# Altium footprint library amirlib.PcbLib: 456 footprints (part 26 of 29)
Each footprint in its own frame and in the unit in brackets; x right, y up, seen from the top. Pads: shape width x height; smd on the part's side, far side on the other; paste and mask are expansions set on the pad; w line width, h text height; cw(c..) or ccw(c..) is an arc to the next point about the centre after c.
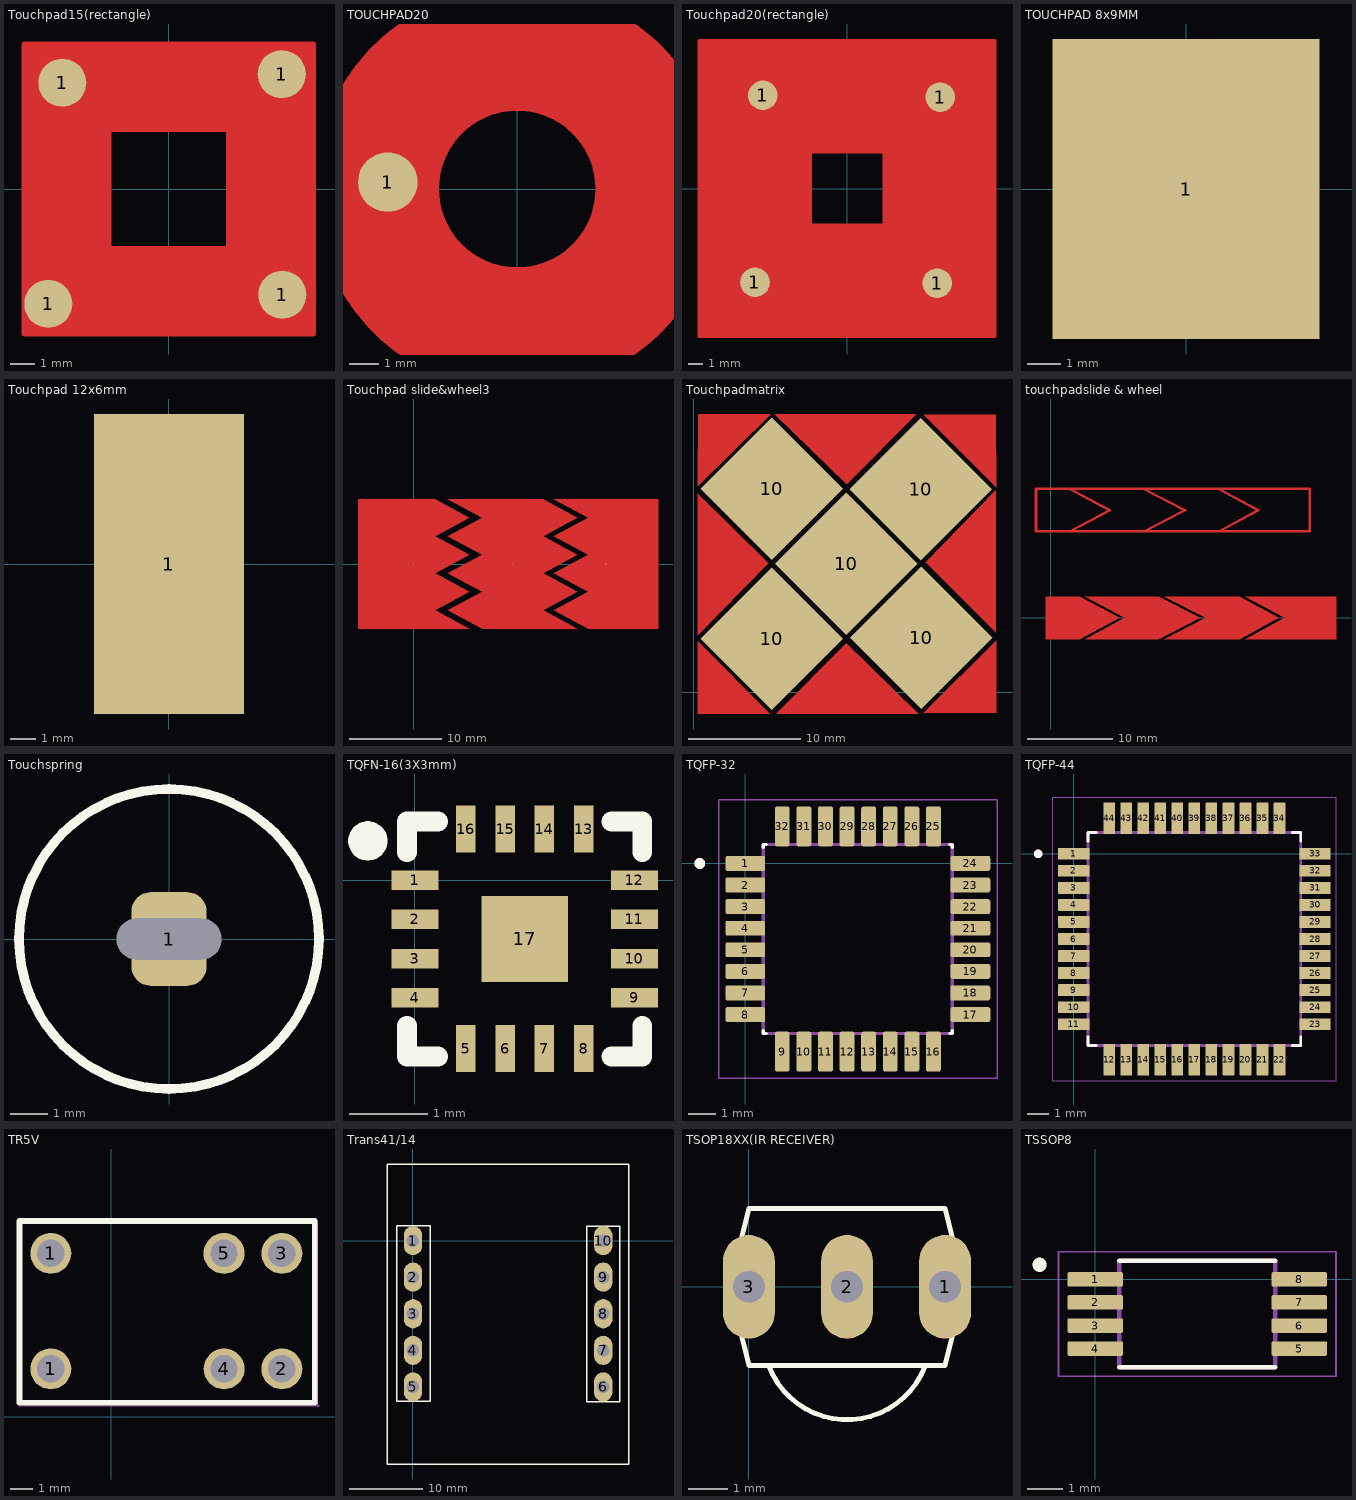
[diagram p25: the footprints below, top view; thin cyan lines are the x and y axes]

## Touchpad15(rectangle) [mm]
pads (4):
  round 2 smd: 1(-5.004,-4.775) 1(-4.42,4.42) 1(4.699,4.775) 1(4.724,-4.394)
Top Layer:
  region: -5.969,6 -5.969,2.54 5.994,2.54 5.994,6
  region: -5.994,-5.987 -5.994,2.642 -2.473,2.642 -2.473,-6.018
  region: -2.5,-2.5 -2.5,-5.893 6.02,-5.893 6.02,-2.512
  region: 2.5,2.743 6,2.743 6,-2.692 2.5,-2.692
  lines w0.254: -6,-6 -6,6 6,6 6,-6 -6,-6 ; -2.5,-2.5 -2.5,2.5 2.5,2.5 2.5,-2.5 -2.5,-2.5
Top Solder:
  region: -6.223,-6.181 -6.223,2.642 -2.388,2.642 -2.388,-6.214
  region: -6.223,6.223 -6.223,2.261 6.223,2.261 6.223,6.223
  region: 2.286,2.743 6.223,2.743 6.223,-2.692 2.286,-2.692
  region: -2.5,-2.355 -2.5,-6.223 6.248,-6.223 6.248,-2.368

## TOUCHPAD20 [mm]
pads (1):
  round 2 smd: 1(-4.343,0.229)
Top Layer:
  circle w4.2: c0,0 r4.726
Top Solder:
  circle w4.2: c0,0 r4.726

## Touchpad20(rectangle) [mm]
pads (4):
  round 2 smd: 1(-6.248,-6.35) 1(-5.715,6.325) 1(6.096,-6.401) 1(6.299,6.198)
Top Layer:
  region: 2.5,2.5 9.957,2.5 9.957,-2.5 2.5,-2.5
  region: -10,10 10,10 10,2.5 -10.054,2.5
  region: -10.054,2.5 -2.54,2.5 -2.54,-10 -10,-10
  region: -2.616,-2.5 -2.616,-10 9.957,-10 9.957,-2.5
  lines w0.254: -10,-10 10,-10 10,10 -10,10 -10,-10 ; -2.5,-2.5 2.5,-2.5 2.5,2.5 -2.5,2.5 -2.5,-2.5
Top Solder:
  rectangle: -10.165,-2.565 -2.365,2.438
  rectangle: -10.165,2.388 10.135,10.138
  rectangle: 2.362,-2.972 10.125,2.5
  rectangle: -10.135,-10.185 10.135,-2.362

## TOUCHPAD 8x9MM [mm]
pads (1):
  rect 8x9 smd: 1(0,0)

## Touchpad 12x6mm [mm]
pads (1):
  rect 6x12 smd: 1(0,0)

## Touchpad slide&wheel3 [mil]
pads (3):
  round 1 smd mask+0: 1(0,0) 2(421.26,0) 3(818.9,0)
Top Layer:
  region: 597.44,-39.37 743.11,-118.11 597.44,-196.85 743.11,-275.59 1040.35,-275.59 1040.35,275.59 597.44,275.59 743.11,196.85 597.44,118.11 743.11,39.37
  region: 145.67,-39.37 291.34,-118.11 145.67,-196.85 291.34,-275.59 696.85,-275.59 551.18,-196.85 696.85,-118.11 551.18,-39.37 696.85,39.37 551.18,118.11 696.85,196.85 551.18,275.59 145.67,275.59 291.34,196.85 145.67,118.11 291.34,39.37
  region: -237.2,-275.59 -237.2,275.59 91.54,275.59 237.2,196.85 91.54,118.11 237.2,39.37 91.54,-39.37 237.2,-118.11 91.54,-196.85 237.2,-275.59

## Touchpadmatrix [mm]
pads (13):
  rect 9x9 smd rot 45 mask+0: 10(6.95,4.8) 10(6.975,18.175) 10(13.625,11.5) 10(20.25,18.15) 10(20.3,4.875)
  round 0.025 smd mask+0: 11(3.5,11.425) 11(3.575,1.325) 11(3.625,21.625) 11(13.55,21.7) 11(13.7,1.25) 11(23.75,1.375) 11(23.75,21.55) 11(23.825,11.7)
Top Layer:
  region: 20.025,-1.887 7.375,-1.887 13.6,4.388
  region: 6.8,-1.925 0.35,4.575 0.375,-1.85 0.375,-1.901
  region: 27,4.6 20.5,-1.85 26.925,-1.825 26.976,-1.825
  region: 20.525,24.8 26.975,18.3 26.95,24.725 26.95,24.776
  region: 0.363,5.1 0.363,17.75 6.638,11.525
  region: 26.962,18.025 26.962,5.375 20.687,11.6
  region: 7.225,24.837 19.875,24.837 13.65,18.562
  region: 0.375,18.4 6.875,24.85 0.45,24.825 0.399,24.825

## touchpadslide & wheel [mil]
pads (4):
  round 1 smd mask+0: 1(147.64,0) 2(426,0) 3(792,0) 4(1112,0)
Top Layer:
  region: 901.86,98.43 1083.95,0 901.86,-98.43 1322.14,-98.43 1322.14,98.43
  region: 526.25,-98.43 718.18,0 526.25,98.43 875.66,98.43 1057.75,0 875.66,-98.43
  region: 159.27,-98.43 343.32,0 159.27,98.43 500.8,98.43 692.73,0 500.8,-98.43
  region: -23.13,-98.43 134.35,-98.43 318.41,0 134.35,98.43 -23.13,98.43
  lines w11.81: 88.58,400.59 430.12,400.59 ; 88.58,400.59 -68.9,400.59 -68.9,597.44 88.58,597.44 ; 88.58,400.59 272.64,499.02 88.58,597.44 ; 88.58,597.44 430.12,597.44 ; 430.12,400.59 779.53,400.59 ; 430.12,400.59 622.05,499.02 430.12,597.44 ; 430.12,597.44 779.53,597.44 ; 779.53,400.59 1199.8,400.59 1199.8,597.44 779.53,597.44 ; 779.53,400.59 961.61,499.02 779.53,597.44

## Touchspring [mm]
pads (1):
  rrect50% 2x2.5 / inner rrect50% 4.2x2.5 / far side rrect50% 4.2x2.5 hole 1.1 slot 2.8 at 0 deg: 1(0,0)
Top Overlay:
  circle w0.254: c0,0 r4

## TQFN-16(3X3mm) [mil]
pads (17):
  rect 23.6x9.8 smd paste-3937 mask+2: 1(0,0) 2(0,-19.6) 3(0,-39.3) 4(0,-59) 9(110.2,-59) 10(110.2,-39.3) 11(110.2,-19.6) 12(110.2,0.1)
  rect 9.8x23.6 smd paste-3937 mask+2: 5(25.6,-84.5) 6(45.3,-84.5) 7(65,-84.5) 8(84.7,-84.5) 13(84.7,25.7) 14(65,25.7) 15(45.3,25.7) 16(25.6,25.7)
  rect 43.3x43.3 smd paste-3937 mask+2: 17(55.1,-29.4)
Top Overlay:
  lines w10: -4,-73 -4,-88.5 11.6,-88.5 ; -4,14.1 -4,29.6 11.6,29.6 ; 98.7,-88.5 114.1,-88.5 114.1,-73 ; 98.7,29.6 114.1,29.6 114.1,14.1 ; -28.6,19.8 -28.2,17.9 -27.2,16.3 -25.6,15.2 -23.7,14.9 -21.8,15.2 -20.2,16.3 -19.1,17.9 -18.8,19.8 -19.1,21.7 -20.2,23.3 -21.8,24.3 -23.7,24.7 -25.6,24.3 -27.2,23.3 -28.2,21.7 -28.6,19.8
Top Paste:
  region: 37.7,-12.1 72.4,-12.1 72.4,-46.7 37.7,-46.7
  region: 89.6,37.5 79.8,37.5 79.8,13.9 89.6,13.9
  region: 69.9,37.5 60.1,37.5 60.1,13.9 69.9,13.9
  region: 50.2,37.5 40.4,37.5 40.4,13.9 50.2,13.9
  region: 30.5,37.5 20.7,37.5 20.7,13.9 30.5,13.9
  region: -11.9,4.9 -11.9,-4.9 11.8,-4.9 11.8,4.9
  region: -11.9,-14.7 -11.9,-24.6 11.8,-24.6 11.8,-14.7
  region: -11.9,-34.4 -11.9,-44.3 11.8,-44.3 11.8,-34.4
  region: -11.8,-54.1 -11.8,-64 11.8,-64 11.8,-54.1
  region: 98.4,5 98.4,-4.8 122,-4.8 122,5
  region: 98.4,-14.7 98.4,-24.5 122,-24.5 122,-14.7
  region: 98.4,-34.4 98.4,-44.2 122,-44.2 122,-34.4
  region: 98.4,-54 98.4,-63.9 122,-63.9 122,-54
  region: 30.5,-72.8 20.7,-72.8 20.7,-96.4 30.5,-96.4
  region: 50.2,-72.7 40.4,-72.7 40.4,-96.4 50.2,-96.4
  region: 69.9,-72.7 60.1,-72.7 60.1,-96.4 69.9,-96.4
  region: 89.6,-72.7 79.8,-72.7 79.8,-96.4 89.6,-96.4
Mechanical 8:
  region: -4,27.3 -5.3,27.6 -6.1,28.6 -6.3,30 -5.8,31.2 -4.7,31.9 -3.3,31.9 -2.2,31.2 -1.7,30 -1.8,28.6 -2.7,27.6
3D body "User Library-QFN-16_3x3.STEP": height 35.43, standoff 0, extent -4.78,-90.4 114.98,29.37

## TQFP-32 [mm]
pads (32):
  rrect25% 1.47x0.55 smd: 1(0,0) 2(0,-0.8) 3(0,-1.6) 4(0,-2.4) 5(0,-3.2) 6(0,-4) 7(0,-4.8) 8(0,-5.6) 17(8.34,-5.6) 18(8.34,-4.8) 19(8.34,-4) 20(8.34,-3.2) 21(8.34,-2.4) 22(8.34,-1.6) 23(8.34,-0.8) 24(8.34,0)
  rrect25% 0.55x1.47 smd: 9(1.37,-6.97) 10(2.17,-6.97) 11(2.97,-6.97) 12(3.77,-6.97) 13(4.57,-6.97) 14(5.37,-6.97) 15(6.17,-6.97) 16(6.97,-6.97) 25(6.97,1.37) 26(6.17,1.37) 27(5.37,1.37) 28(4.57,1.37) 29(3.77,1.37) 30(2.97,1.37) 31(2.17,1.37) 32(1.37,1.37)
Top Overlay:
  circle w0.2: c-1.69,0 r0.1
  lines w0.127: 0.67,-6.195 0.67,-6.3 0.775,-6.3 ; 0.67,0.595 0.67,0.7 0.775,0.7 ; 7.565,-6.3 7.67,-6.3 7.67,-6.195 ; 7.565,0.7 7.67,0.7 7.67,0.595
Mechanical 13:
  circle w0.2: c-1.69,0 r0.1
  lines w0.127: 0.67,-6.3 7.67,-6.3 7.67,0.7 0.67,0.7 0.67,-6.3
Mechanical 15:
  lines w0.05: -0.985,-7.955 9.325,-7.955 9.325,2.355 -0.985,2.355 -0.985,-7.955
3D body "ATMEGA4808-AFR--3DModel-STEP-269445.STEP": height 1.2, standoff 0, extent -0.33,-7.3 8.67,1.7

## TQFP-44 [mm]
pads (44):
  rrect9% 1.47x0.55 smd: 1(0,0) 2(0,-0.8) 3(0,-1.6) 4(0,-2.4) 5(0,-3.2) 6(0,-4) 7(0,-4.8) 8(0,-5.6) 9(0,-6.4) 10(0,-7.2) 11(0,-8) 23(11.34,-8) 24(11.34,-7.2) 25(11.34,-6.4) 26(11.34,-5.6) 27(11.34,-4.8) 28(11.34,-4) 29(11.34,-3.2) 30(11.34,-2.4) 31(11.34,-1.6) 32(11.34,-0.8) 33(11.34,0)
  rrect9% 0.55x1.47 smd: 12(1.67,-9.67) 13(2.47,-9.67) 14(3.27,-9.67) 15(4.07,-9.67) 16(4.87,-9.67) 17(5.67,-9.67) 18(6.47,-9.67) 19(7.27,-9.67) 20(8.07,-9.67) 21(8.87,-9.67) 22(9.67,-9.67) 34(9.67,1.67) 35(8.87,1.67) 36(8.07,1.67) 37(7.27,1.67) 38(6.47,1.67) 39(5.67,1.67) 40(4.87,1.67) 41(4.07,1.67) 42(3.27,1.67) 43(2.47,1.67) 44(1.67,1.67)
Top Overlay:
  circle w0.2: c-1.67,0 r0.1
  lines w0.127: 0.67,-8.595 0.67,-9 1.075,-9 ; 0.67,0.595 0.67,1 1.075,1 ; 10.265,-9 10.67,-9 10.67,-8.595 ; 10.265,1 10.67,1 10.67,0.595
Mechanical 13:
  circle w0.2: c-1.67,0 r0.1
  lines w0.127: 0.67,-9 0.67,1 10.67,1 10.67,-9 0.67,-9
Mechanical 15:
  lines w0.05: -0.985,-10.655 -0.985,2.655 12.325,2.655 12.325,-10.655 -0.985,-10.655
3D body "step_temp.STEP": height 1.2, standoff 0, extent -0.33,-10 11.67,2

## TR5V [mil]
pads (6):
  round 70.9 hole 47.2: 1(-104.9,83) 1(-104.9,283) 2(295.1,83) 3(295.1,283) 4(195.1,83) 5(195,283)
Top Overlay:
  lines w10: -158.9,24.4 -158.9,339 352.1,339 352.1,24.4 -158.9,24.4
Mechanical 6:
  lines w2: -159.9,19.4 -159.9,339 357.1,339 357.1,19.4 -159.9,19.4
Mechanical 8:
  region: 354.8,19.4 355.2,20.7 356.2,21.5 357.5,21.7 358.7,21.2 359.4,20 359.4,18.7 358.7,17.6 357.5,17 356.2,17.2 355.2,18.1

## Trans41/14 [mm]
pads (10):
  oval 2.5x4 hole 1.7: 1(0,0) 2(0,-5) 3(0,-10) 4(0,-15) 5(0,-20) 6(26,-20) 7(26,-15) 8(26,-10) 9(26,-5) 10(26,0)
Top Overlay:
  lines w0.2: -3.511,-30.531 29.489,-30.531 29.489,10.469 -3.511,10.469 -3.511,-30.531 ; -2.21,-21.971 2.362,-21.971 2.362,2.007 -2.21,2.007 -2.21,-21.971 ; 23.724,-22.047 28.296,-22.047 28.296,1.93 23.724,1.93 23.724,-22.047
3D body "Transkala_6V_300mA_41x14.step": height 30.05, standoff -3.95, extent -3.546,-30.508 29.454,10.492

## TSOP18XX(IR RECEIVER) [mil]
pads (3):
  oval 52x104 hole 32: 1(196.85,0) 2(98.43,0) 3(0,0)
Top Overlay:
  lines w5: 19.92,-79.35 ccw(c98.43,-49.21) 176.93,-79.35 ; -19.69,0 0,-78.74 19.68,-78.74 177.17,-78.74 196.85,-78.74 216.54,0 196.85,78.74 0,78.74 -19.69,0
3D body "TSOP1838--3DModel-STEP-510211.STEP": height 816.93, standoff -403.54, extent -19,-61.1 217.22,158.78

## TSSOP8 [mm]
pads (8):
  rrect25% 1.57x0.41 smd: 1(0,0) 2(0,-0.65) 3(0,-1.3) 4(0,-1.95) 5(5.74,-1.95) 6(5.74,-1.3) 7(5.74,-0.65) 8(5.74,0)
Top Overlay:
  circle w0.2: c-1.57,0.41 r0.1
  lines w0.127: 0.67,-2.475 5.07,-2.475 ; 0.67,0.525 5.07,0.525
Mechanical 13:
  circle w0.2: c-1.57,0.41 r0.1
  lines w0.127: 0.67,-2.475 5.07,-2.475 5.07,0.525 0.67,0.525 0.67,-2.475
Mechanical 15:
  lines w0.05: -1.035,-2.725 6.775,-2.725 6.775,0.775 -1.035,0.775 -1.035,-2.725
3D body "SN65240PWG4.STEP": height 1.2, standoff 0, extent -0.33,-2.475 6.07,0.525